# Altium schematic symbol library Inductance.SchLib: 1 symbol
Pins are listed as number, name and electrical type; pins without a type are passive.

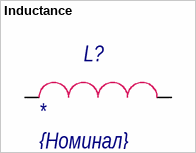
[diagram p0: symbol Inductance]

## Inductance
designator L?  value {Номинал}
pins: 1, 2